# Altium footprint library CoilcraftPCB.PcbLib: 320 footprints (part 3 of 20)
Each footprint in its own frame and in the unit in brackets; x right, y up, seen from the top. Pads: shape width x height; smd on the part's side, far side on the other; paste and mask are expansions set on the pad; w line width, h text height; cw(c..) or ccw(c..) is an arc to the next point about the centre after c.
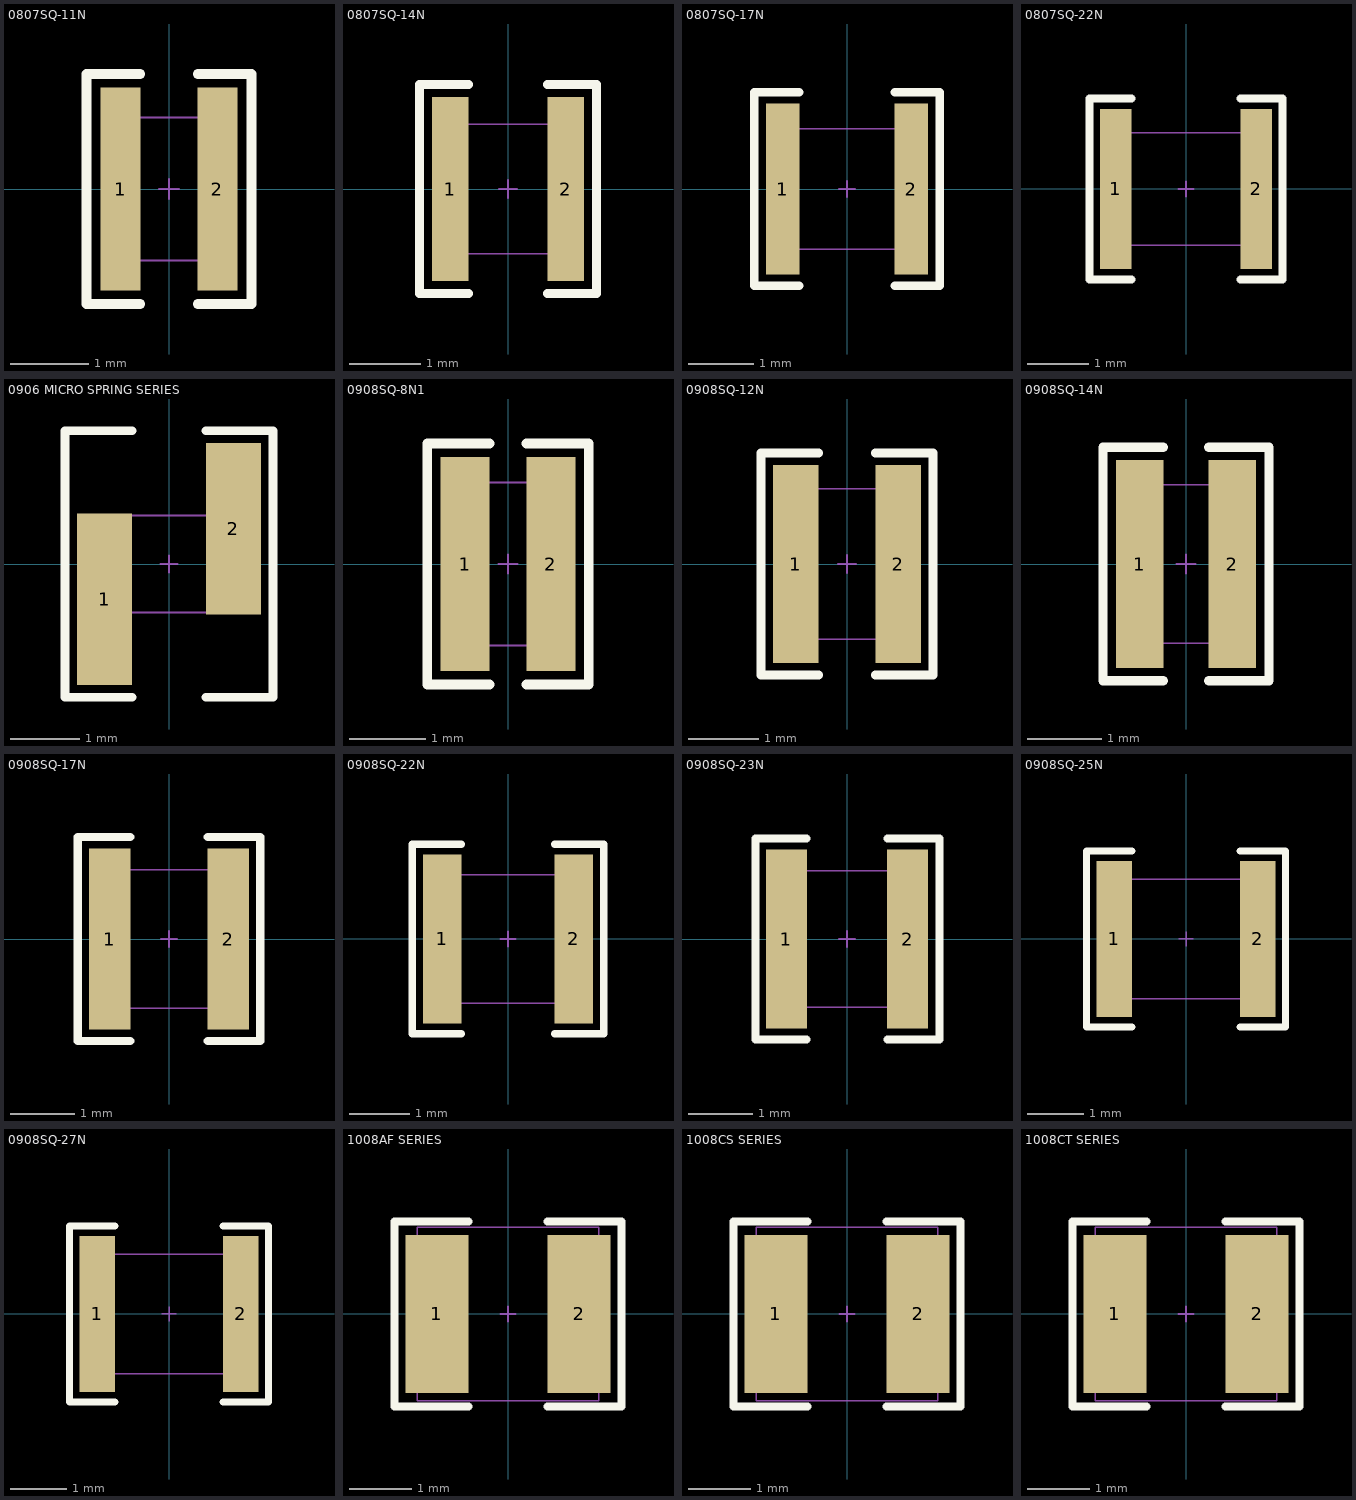
[diagram p2: the footprints below, top view; thin cyan lines are the x and y axes]

## 0807SQ-11N [mm] "Coilcraft Square Air Coil Inductor"
height 1.524
pads (2):
  rect 0.51x2.6 smd: 1(-0.62,0) 2(0.62,0)
Top Overlay:
  lines w0.127: -0.368,-1.473 -1.054,-1.473 -1.054,1.473 -0.368,1.473 ; 0.368,-1.473 1.054,-1.473 1.054,1.473 0.368,1.473
Mechanical 13:
  lines w0.025: -0.127,0 0.127,0 ; 0,-0.127 0,0.127
Mechanical 14:
  lines w0.025: -0.774,-0.914 0.774,-0.914 0.774,0.914 -0.774,0.914 -0.774,-0.914
3D body: height 1.79, standoff 0.01, extent -0.85,-1.037 0.85,1.054

## 0807SQ-14N [mm] "Coilcraft Square Air Coil Inductor"
height 1.524
pads (2):
  rect 0.51x2.6 smd: 1(-0.815,0) 2(0.815,0)
Top Overlay:
  lines w0.127: -0.559,-1.473 -1.245,-1.473 -1.245,1.473 -0.559,1.473 ; 0.559,-1.473 1.245,-1.473 1.245,1.473 0.559,1.473
Mechanical 13:
  lines w0.025: -0.127,0 0.127,0 ; 0,-0.127 0,0.127
Mechanical 14:
  lines w0.025: -0.965,-0.914 0.965,-0.914 0.965,0.914 -0.965,0.914 -0.965,-0.914
3D body: height 1.78, standoff 0.01, extent -1.041,-1.056 1.041,1.041

## 0807SQ-17N [mm] "Coilcraft Square Air Coil Inductor"
height 1.524
pads (2):
  rect 0.51x2.6 smd: 1(-0.98,0) 2(0.98,0)
Top Overlay:
  lines w0.127: -0.724,-1.473 -1.41,-1.473 -1.41,1.473 -0.724,1.473 ; 0.724,-1.473 1.41,-1.473 1.41,1.473 0.724,1.473
Mechanical 13:
  lines w0.025: -0.127,0 0.127,0 ; 0,-0.127 0,0.127
Mechanical 14:
  lines w0.025: -1.143,-0.914 -1.143,0.914 1.143,0.914 1.143,-0.914 -1.143,-0.914
3D body: height 1.78, standoff 0, extent -1.219,-1.045 1.219,1.054

## 0807SQ-22N [mm] "Coilcraft Square Air Coil Inductor"
height 1.524
pads (2):
  rect 0.51x2.6 smd: 1(-1.145,0) 2(1.145,0)
Top Overlay:
  lines w0.127: -0.889,-1.473 -1.575,-1.473 -1.575,1.473 -0.889,1.473 ; 0.889,-1.473 1.575,-1.473 1.575,1.473 0.889,1.473
Mechanical 13:
  lines w0.025: -0.127,0 0.127,0 ; 0,-0.127 0,0.127
Mechanical 14:
  lines w0.025: -1.295,-0.914 1.295,-0.914 1.295,0.914 -1.295,0.914 -1.295,-0.914
3D body: height 1.79, standoff 0.01, extent -1.372,-1.052 1.372,1.041

## 0906 MICRO SPRING SERIES [mil] "Micro Spring Air Core Inductor"
height 60
pads (2):
  rect 31x97 smd: 1(-36.5,-20) 2(36.5,20)
Top Overlay:
  lines w5: -21,-75.5 -59,-75.5 -59,75.5 -21,75.5 ; 21,-75.5 59,-75.5 59,75.5 21,75.5
Mechanical 13:
  lines w1: -5,0 5,0 ; 0,-5 0,5
Mechanical 14:
  lines w1: -47.5,-27.5 47.5,-27.5 47.5,27.5 -47.5,27.5 -47.5,-27.5
3D body: height 52, standoff 0, extent -45.2,-62.5 45.2,62.5

## 0908SQ-8N1 [mm] "Coilcraft Square Air Coil Inductor"
height 1.829
pads (2):
  rect 0.64x2.8 smd: 1(-0.56,0) 2(0.56,0)
Top Overlay:
  lines w0.127: -0.241,-1.575 -1.054,-1.575 -1.054,1.575 -0.241,1.575 ; 0.241,-1.575 1.054,-1.575 1.054,1.575 0.241,1.575
Mechanical 13:
  lines w0.025: -0.127,0 0.127,0 ; 0,-0.127 0,0.127
Mechanical 14:
  lines w0.025: -0.736,-1.067 -0.736,1.067 0.736,1.067 0.736,-1.067 -0.736,-1.067
3D body: height 1.96, standoff -0.02, extent -0.813,-1.169 0.813,1.156

## 0908SQ-12N [mm] "Coilcraft Square Air Coil Inductor"
height 1.829
pads (2):
  rect 0.64x2.8 smd: 1(-0.725,0) 2(0.725,0)
Top Overlay:
  lines w0.127: -0.406,-1.575 -1.219,-1.575 -1.219,1.575 -0.406,1.575 ; 0.406,-1.575 1.219,-1.575 1.219,1.575 0.406,1.575
Mechanical 13:
  lines w0.025: -0.127,0 0.127,0 ; 0,-0.127 0,0.127
Mechanical 14:
  lines w0.025: -0.927,-1.067 -0.927,1.067 0.927,1.067 0.927,-1.067 -0.927,-1.067
3D body: height 1.96, standoff -0.02, extent -1.003,-1.164 1.003,1.156

## 0908SQ-14N [mm] "Coilcraft Square Air Coil Inductor"
height 1.829
pads (2):
  rect 0.64x2.8 smd: 1(-0.62,0) 2(0.62,0)
Top Overlay:
  lines w0.127: -0.305,-1.575 -1.118,-1.575 -1.118,1.575 -0.305,1.575 ; 0.305,-1.575 1.118,-1.575 1.118,1.575 0.305,1.575
Mechanical 13:
  lines w0.025: -0.127,0 0.127,0 ; 0,-0.127 0,0.127
Mechanical 14:
  lines w0.025: -0.774,-1.067 0.774,-1.067 0.774,1.067 -0.774,1.067 -0.774,-1.067
3D body: height 1.99, standoff 0.01, extent -0.85,-1.151 0.85,1.143

## 0908SQ-17N [mm] "Coilcraft Square Air Coil Inductor"
height 1.829
pads (2):
  rect 0.64x2.8 smd: 1(-0.915,0) 2(0.915,0)
Top Overlay:
  lines w0.127: -0.597,-1.575 -1.41,-1.575 -1.41,1.575 -0.597,1.575 ; 0.597,-1.575 1.41,-1.575 1.41,1.575 0.597,1.575
Mechanical 13:
  lines w0.025: -0.127,0 0.127,0 ; 0,-0.127 0,0.127
Mechanical 14:
  lines w0.025: -1.105,-1.067 -1.105,1.067 1.105,1.067 1.105,-1.067 -1.105,-1.067
3D body: height 1.96, standoff -0.02, extent -1.18,-1.156 1.18,1.156

## 0908SQ-22N [mm] "Coilcraft Square Air Coil Inductor"
height 1.829
pads (2):
  rect 0.64x2.8 smd: 1(-1.09,0) 2(1.09,0)
Top Overlay:
  lines w0.127: -0.775,-1.575 -1.587,-1.575 -1.587,1.575 -0.775,1.575 ; 0.775,-1.575 1.587,-1.575 1.587,1.575 0.775,1.575
Mechanical 13:
  lines w0.025: -0.127,0 0.127,0 ; 0,-0.127 0,0.127
Mechanical 14:
  lines w0.025: -1.285,-1.067 1.285,-1.067 1.285,1.067 -1.285,1.067 -1.285,-1.067
3D body: height 1.96, standoff -0.02, extent -1.358,-1.15 1.358,1.156

## 0908SQ-23N [mm] "Coilcraft Square Air Coil Inductor"
height 1.829
pads (2):
  rect 0.64x2.8 smd: 1(-0.95,0) 2(0.95,0)
Top Overlay:
  lines w0.127: -0.635,-1.575 -1.435,-1.575 -1.435,1.575 -0.635,1.575 ; 0.635,-1.575 1.448,-1.575 1.448,1.575 0.635,1.575
Mechanical 13:
  lines w0.025: -0.127,0 0.127,0 ; 0,-0.127 0,0.127
Mechanical 14:
  lines w0.025: -1.117,-1.067 -1.117,1.067 1.117,1.067 1.117,-1.067 -1.117,-1.067
3D body: height 1.99, standoff 0.01, extent -1.193,-1.151 1.193,1.143

## 0908SQ-25N [mm] "Coilcraft Square Air Coil Inductor"
height 1.829
pads (2):
  rect 0.64x2.8 smd: 1(-1.285,0) 2(1.285,0)
Top Overlay:
  lines w0.127: -0.965,-1.575 -1.778,-1.575 -1.778,1.575 -0.965,1.575 ; 0.965,-1.575 1.778,-1.575 1.778,1.575 0.965,1.575
Mechanical 13:
  lines w0.025: -0.127,0 0.127,0 ; 0,-0.127 0,0.127
Mechanical 14:
  lines w0.025: -1.486,-1.067 -1.486,1.067 1.486,1.067 1.486,-1.067 -1.486,-1.067
3D body: height 1.96, standoff -0.02, extent -1.562,-1.153 1.562,1.156

## 0908SQ-27N [mm] "Coilcraft Square Air Coil Inductor"
height 1.829
pads (2):
  rect 0.64x2.8 smd: 1(-1.285,0) 2(1.285,0)
Top Overlay:
  lines w0.127: -0.965,-1.575 -1.778,-1.575 -1.778,1.575 -0.965,1.575 ; 0.965,-1.575 1.778,-1.575 1.778,1.575 0.965,1.575
Mechanical 13:
  lines w0.025: -0.127,0 0.127,0 ; 0,-0.127 0,0.127
Mechanical 14:
  lines w0.025: -1.486,-1.067 -1.486,1.067 1.486,1.067 1.486,-1.067 -1.486,-1.067
3D body: height 1.96, standoff -0.02, extent -1.562,-1.153 1.562,1.156

## 1008AF SERIES [mil] "Coilcraft Chip Inductor"
height 75
pads (2):
  rect 40x100 smd: 1(-45,0) 2(45,0)
Top Overlay:
  lines w5: -25,-58.5 -72,-58.5 -72,58.5 -25,58.5 ; 25,-58.5 72,-58.5 72,58.5 25,58.5
Mechanical 13:
  lines w1: -5,0 5,0 ; 0,-5 0,5
Mechanical 14:
  lines w1: -57.5,-55 57.5,-55 57.5,55 -57.5,55 -57.5,-55
3D body: height 75.2, standoff -0.39, extent -57.56,-54.72 57.56,54.73

## 1008CS SERIES [mil] "Coilcraft Chip Inductor"
height 80
pads (2):
  rect 40x100 smd: 1(-45,0) 2(45,0)
Top Overlay:
  lines w5: -25,-58.5 -72,-58.5 -72,58.5 -25,58.5 ; 25,-58.5 72,-58.5 72,58.5 25,58.5
Mechanical 13:
  lines w1: -5,0 5,0 ; 0,-5 0,5
Mechanical 14:
  lines w1: -57.5,-55 -57.5,55 57.5,55 57.5,-55 -57.5,-55
3D body: height 97.64, standoff -0.39, extent -57.48,-54.92 57.48,54.92

## 1008CT SERIES [mil] "Coilcraft Chip Inductor"
height 80
pads (2):
  rect 40x100 smd: 1(-45,0) 2(45,0)
Top Overlay:
  lines w5: -25,-58.5 -72,-58.5 -72,58.5 -25,58.5 ; 25,-58.5 72,-58.5 72,58.5 25,58.5
Mechanical 13:
  lines w1: -5,0 5,0 ; 0,-5 0,5
Mechanical 14:
  lines w1: -57.5,-55 -57.5,55 57.5,55 57.5,-55 -57.5,-55
3D body: height 49.61, standoff -0.39, extent -57.48,-54.92 57.48,54.92